# Altium integrated library TSW-101-23-G-T.IntLib: 1 symbol
Pins are listed as number, name and electrical type; pins without a type are passive.

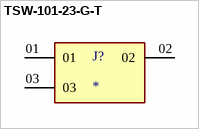
[diagram p0: symbol TSW-101-23-G-T]

## TSW-101-23-G-T
designator J?
MP: TSW-101-23-G-T; Package: None; Price: None; Value: *; Availability: Unavailable
footprint SAMTEC_TSW-101-23-G-T
pins: 01, 02, 03